# Altium schematic symbol library SS8050 Y1_C42441445.SCHLIB: 1 symbol
Pins are listed as number, name and electrical type; pins without a type are passive.

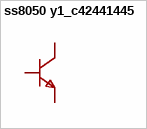
[diagram p0: symbol ss8050 y1_c42441445]

## ss8050 y1_c42441445
designator Q??  (value not drawn)
晶体管类型:NPN;集电极电流(Ic):1.5A;集射极击穿电压(Vceo):25V;耗散功率(Pd):300mW;直流电流增益(hFE):400;; Manufacturer: TDSEMIC(拓电半导体); AddInBom: yes; ModelId: d6da7d402cef4f10869fb4f7686eaa0f; ModelName: SOT-23-3_L2.9-W1.5-P2.0-LS2.5-BR; ModelTransform: 102.362,114.173,0,0,0,0,-0.001,0.002,0; type: NPN; Current - Collector(Ic): 1.5A; Collector - Emitter Voltage VCEO: 25V; Pd - Power Dissipation: 300mW; DC Current Gain: 400; Transition frequency(fT): 100MHz; Current - Collector Cutoff: 100nA; Vce Saturation(VCE(sat)): 500mV; Emitter-Base Voltage(Vebo): 5V; Number: 1个NPN; Symbol: SS8050 Y1_C42441445; LCSC Part Name: NPN 电流:1.5A 电压:25V; SupplierPart: C42441445; ManufacturerPart: SS8050 Y1; Supplier Footprint: SOT-23; JLCPCB Part Class: Extended Part; Datasheet: https://item.szlcsc.com/datasheet/SS8050%2520Y1/44491119.html; Supplier: LCSC; ConvertToPcb: yes; FootprintName: SOT-23-3_L2.9-W1.5-P2.0-LS2.5-BR; Operating Temperature: -; Configuration: -
footprint SOT-23-3_L2.9-W1.5-P2.0-LS2.5-BR
pins: 1 B, 2 E, 3 C